# Altium schematic symbol library Resistor.SchLib: 1085 symbols (part 10 of 29)
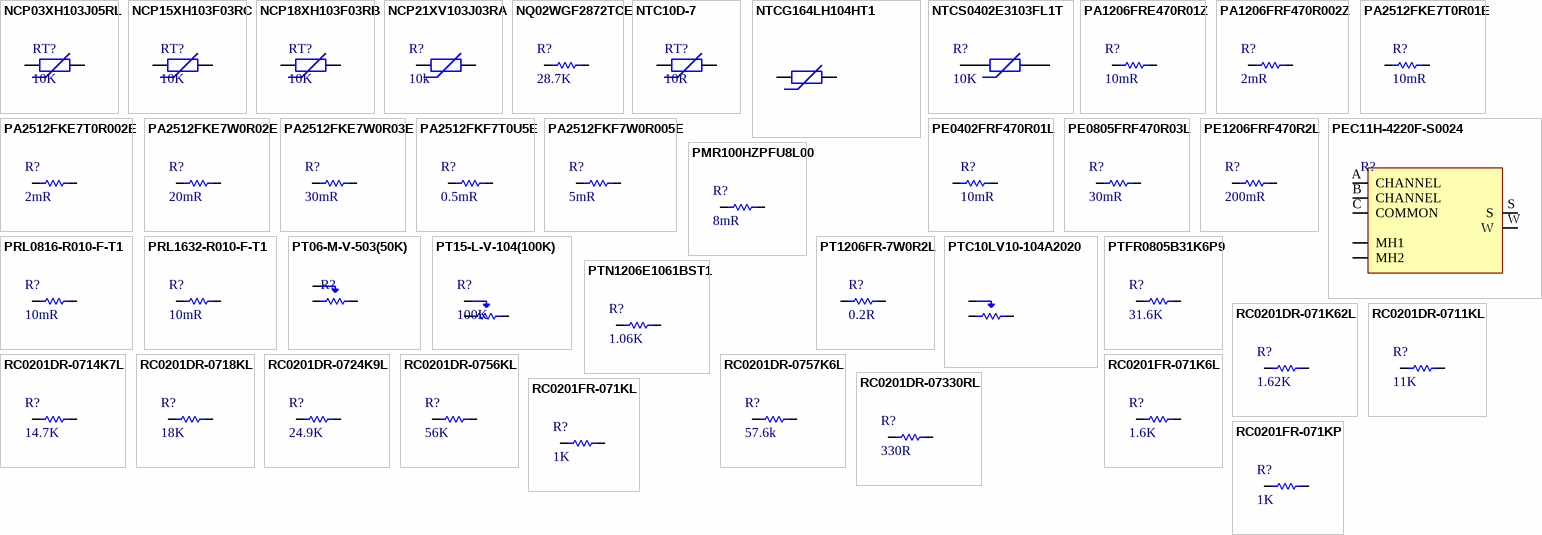
[diagram p36: symbols NCP03XH103J05RL to RC0201FR-071KP]

## PA2512FKE7W0R03E
designator R?, comment 30mR
RES 0.03 OHM 1% 2W 2512; Manufacturer: Yageo; Manufacturer Part Number: PA2512FKE7W0R03E; Item Type: Resistor; Supplier: Avnet; LCSC Part Number: C728311; RoHS: No; Stock: 4000; Pricing: 1=0.655, 25=0.542, 50=0.453, 100=0.364, 250=0.314 (USD)
footprint RES-2512
pins: 1, 2

## PA2512FKF7T0U5E
designator R?, comment 0.5mR
METAL CURRENT SENSOR 2512 1% 100; Manufacturer: Yageo; Manufacturer Part Number: PA2512FKF7T0U5E; Item Type: Resistors; Power Rating: 3W; Temperature Coefficient: 100ppm/°C; Supplier: Avnet; LCSC Part Number: PA2512FKF7T0U5E; RoHS: Yes; Stock: 12000; Pricing: 4000=0.23986 (USD); Case/Package: 348Case; Min Operating Temperature: -55°C; Max Operating Temperature: 170°C; Tolerance: 1%; Height: 880um; ComponentLink1URL: https://www.yageo.com/upload/media/product/productsearch/datasheet/rchip/PYu-PA_E_51_RoHS_10.pdf?src-supplier=Digikey; ComponentLink1Description: https://www.yageo.com/upload/media/product/productsearch/datasheet/rchip/PYu-PA_E_51_RoHS_10.pdf?src-supplier=Digikey; ComponentLink2URL: https://datasheet.octopart.com/PA2512FKF7T0U5E-Yageo-datasheet-137700559.pdf?src-supplier=Future+Electronics; ComponentLink2Description: https://datasheet.octopart.com/PA2512FKF7T0U5E-Yageo-datasheet-137700559.pdf?src-supplier=Future+Electronics
footprint RES-2512
pins: 1, 2

## PA2512FKF7W0R005E
designator R?, comment 5mR
RES 0.005 OHM 1% 2W 2512; Manufacturer: Yageo; Manufacturer Part Number: PA2512FKF7W0R005E; Item Type: Resistor; Supplier: Digikey; LCSC Part Number: C309526; RoHS: Yes; Stock: 29748; Pricing: 1=0.74, 10=0.519, 25=0.4448, 50=0.3866, 100=0.3029, 250=0.27708, 500=0.22554, 1000=0.17888 (USD); ComponentLink1URL: http://www.mouser.com/ds/2/447/PYu-PA_E_51_RoHS_5-1077983.pdf?src-supplier=Mouser; ComponentLink1Description: http://www.mouser.com/ds/2/447/PYu-PA_E_51_RoHS_5-1077983.pdf?src-supplier=Mouser; ComponentLink2URL: https://datasheet.octopart.com/PA2512FKF7W0R005E-Yageo-datasheet-137700559.pdf?src-supplier=Newark; ComponentLink2Description: https://datasheet.octopart.com/PA2512FKF7W0R005E-Yageo-datasheet-137700559.pdf?src-supplier=Newark; ComponentLink3URL: http://www.yageo.com/documents/recent/PYu-PA_E_51_RoHS_10.pdf?src-supplier=Digikey; ComponentLink3Description: http://www.yageo.com/documents/recent/PYu-PA_E_51_RoHS_10.pdf?src-supplier=Digikey; ComponentLink4URL: http://www.yageo.com/documents/recent/PYu-PA_E_51_RoHS_6.pdf?src-supplier=Digikey; ComponentLink4Description: http://www.yageo.com/documents/recent/PYu-PA_E_51_RoHS_6.pdf?src-supplier=Digikey; ComponentLink5URL: https://datasheet.octopart.com/PA2512FKF7W0R005E-Yageo-datasheet-102263284.pdf?src-supplier=Future+Electronics; ComponentLink5Description: https://datasheet.octopart.com/PA2512FKF7W0R005E-Yageo-datasheet-102263284.pdf?src-supplier=Future+Electronics
footprint RES-2512
pins: 1, 2

## PE0402FRF470R01L
designator R?, comment 10mR
RES 0.01 OHM 1% 1/4W 0402; Manufacturer: Yageo; Manufacturer Part Number: PE0402FRF470R01L; Max Power Dissipation: 250mW; Temperature Coefficient: 100ppm/°C; Item Type: Resistor; Supplier: Digikey; Supplier Part Number: 13-PE0402FRF470R01LDKR-ND; RoHS: Yes; Category: Chip SMD Resistors; Pricing: 1=0.87, 10=0.719, 25=0.666, 50=0.6086, 100=0.5006, 250=0.45928, 500=0.3812, 1000=0.31002, 5000=0.29578 (USD); Case/Package: 0402; Min Operating Temperature: -55°C; Max Operating Temperature: 125°C; Package Quantity: 10000; Packaging: Tape and Reel; Value: 10mR; Number of Terminations: 2; Tolerance: 1%; Features: Moisture Resistant,Automotive AEC-Q200; Series: PE; Length: 0.039inch; Width: 0.02inch; Height: 0.02inch; ComponentLink1URL: http://www.mouser.com/ds/2/447/PYu-PE_521_RoHS_L_3-771548.pdf?src-supplier=Mouser; ComponentLink1Description: http://www.mouser.com/ds/2/447/PYu-PE_521_RoHS_L_3-771548.pdf?src-supplier=Mouser; ComponentLink2URL: http://www.yageo.com/documents/recent/PYu-PE_521_RoHS_L_5.pdf?src-supplier=Digikey; ComponentLink2Description: http://www.yageo.com/documents/recent/PYu-PE_521_RoHS_L_5.pdf?src-supplier=Digikey; LCSC Part Number: C851613
footprint Res-0402
pins: 1, 2

## PE0805FRF470R03L
designator R?, comment 30mR
RES 0.03 OHM 1% 1/2W 0805; Manufacturer: Yageo; Manufacturer Part Number: PE0805FRF470R03L; Item Type: Resistor; Supplier: Future Electronics; LCSC Part Number: C858599; RoHS: Yes; Stock: 5000; Pricing: 5000=0.124, 10000=0.122, 15000=0.121, 20000=0.12, 25000=0.117 (USD); ComponentLink1URL: http://www.mouser.com/ds/2/447/PYu-PE_521_RoHS_L_5-1077989.pdf?src-supplier=Mouser; ComponentLink1Description: http://www.mouser.com/ds/2/447/PYu-PE_521_RoHS_L_5-1077989.pdf?src-supplier=Mouser; ComponentLink2URL: http://www.yageo.com/documents/recent/PYu-PE_521_RoHS_L_5.pdf?src-supplier=Digikey; ComponentLink2Description: http://www.yageo.com/documents/recent/PYu-PE_521_RoHS_L_5.pdf?src-supplier=Digikey
footprint RES-0805 (SMD 0805)
pins: 1, 2

## PE1206FRF470R2L
designator R?, comment 200mR
RES 0.2 OHM 1% 1W 1206; Manufacturer: Yageo; Manufacturer Part Number: PE1206FRF470R2L; Item Type: Resistors; Temperature Coefficient: 100ppm/°C; Supplier: Digikey; LCSC Part Number: C723709; RoHS: Yes; Stock: 7734; Pricing: 1=0.63, 10=0.459, 25=0.368, 50=0.2732, 100=0.1927, 250=0.17164, 500=0.14714, 1000=0.1121 (USD); Case/Package: 340Case; Packaging: 10Packaging; Value: 200mR; RoHS Compliant: Yes
footprint Res-1206
pins: 1, 2

## PEC11H-4220F-S0024
designator R?
11mm Encoder with 24 Detent Force 20mm Metal Flatted Shaft PC Pin Horizontal/Rear Facing; Manufacturer: Bourns; Manufacturer Part Number: PEC11H-4220F-S0024; Supplier: Digikey; Supplier Part Number: 118-PEC11H-4220F-S0024-ND; RoHS: No; Stock: 1001; Pricing: 1=3.04, 5=2.746, 10=2.565, 25=2.3516, 75=2.194, 150=2.0646, 300=1.89023, 450=1.77209, 975=1.65958 (USD); Item Type: Encoder; Package: Custom; LCSC Part Number: -; ComponentLink1Description: Digikey; ComponentLink1URL: https://www.digikey.com/en/products/detail/bourns-inc/PEC11H-4220F-S0024/12349532
footprint PEC11H-4220F-S0024
pins: A CHANNEL, B CHANNEL, C COMMON, MH1, MH2, S, W

## PMR100HZPFU8L00
designator R?, comment 8mR
RES 0.008 OHM 1% 2W 2512; Manufacturer: Rohm; Manufacturer Part Number: PMR100HZPFU8L00; Item Type: Resistor; Temperature Coefficient: 100ppm/°C; Supplier: Mouser; LCSC Part Number: C509729; RoHS: Yes; Stock: 23905; Pricing: 1=0.36, 10=0.276, 50=0.276, 100=0.23, 1000=0.193, 10000=0.192 (USD); Case/Package: 2512; Case Code (Imperial): 2512; Case Code (Metric): 6432; Min Operating Temperature: -55°C; Max Operating Temperature: 155°C; Tolerance: 1%; Value: 8mR; Power Rating: 2W; Features: Automotive AEC-Q200; Series: PMR; Packaging: Cut Tape; Max Power Dissipation: 2W; Number of Terminations: 2; Ratings: AEC-Q200; Lead Free: Lead Free; RoHS Compliant: Yes; ComponentLink1URL: https://datasheet.ciiva.com/16477/pmr03ezp-16477837.pdf?src-supplier=Future+Electronics; ComponentLink1Description: https://datasheet.ciiva.com/16477/pmr03ezp-16477837.pdf?src-supplier=Future+Electronics
footprint RES-2512
pins: 1, 2

## PRL0816-R010-F-T1
designator R?, comment 10mR
Current Sense Resistors - SMD 1/3W 0.01ohm 1%; Manufacturer: Susumu; Manufacturer Part Number: PRL0816-R010-F-T1; Supplier: Mouser; Supplier Part Number: 754-PRL0816-R010-FT1; RoHS: Yes; Item Type: Resistors; Stock: 4570; Pricing: 1=0.6, 10=0.429, 50=0.429, 100=0.224, 1000=0.183, 10000=0.116 (USD); Min Operating Temperature: -40°C; Max Operating Temperature: 125°C; Lead Free: 5697LeadFree; ComponentLink1URL: http://www.mouser.com/ds/2/392/n_catalog_partition07_en-1114612.pdf?src-supplier=Mouser; ComponentLink1Description: http://www.mouser.com/ds/2/392/n_catalog_partition07_en-1114612.pdf?src-supplier=Mouser
footprint RES-0306
pins: 1, 2

## PRL1632-R010-F-T1
designator R?, comment 10mR
RES 0.01 OHM 1W 1206 WIDE; Manufacturer: Susumu; Manufacturer Part Number: PRL1632-R010-F-T1; Item Type: Resistor; Supplier: Digikey; RoHS: Yes; Category: Chip SMD Resistors; Pricing: 1=0.99, 10=0.568, 25=0.4616, 50=0.397, 100=0.3431, 250=0.28528, 500=0.24984 (USD); Lead Free: 5697LeadFree; ComponentLink1URL: https://datasheet.ciiva.com/2490/prl-rl-data-sheet-2490741.pdf?src-supplier=Digikey; ComponentLink1Description: https://datasheet.ciiva.com/2490/prl-rl-data-sheet-2490741.pdf?src-supplier=Digikey; ComponentLink2URL: https://datasheet.ciiva.com/2490/prl-rl-data-sheet-2490739.pdf?src-supplier=Digikey; ComponentLink2Description: https://datasheet.ciiva.com/2490/prl-rl-data-sheet-2490739.pdf?src-supplier=Digikey; ComponentLink3URL: https://datasheet.ciiva.com/2490/prl-rl-data-sheet-2490740.pdf?src-supplier=Digikey; ComponentLink3Description: https://datasheet.ciiva.com/2490/prl-rl-data-sheet-2490740.pdf?src-supplier=Digikey
footprint Res 1206 Wide
pins: 1, 2

## PT06-M-V-503(50K)
designator R?
20% 150mW 50kΩ - Variable Resistors/Potentiometers ROHS; Manufacturer: BOCHEN; Manufacturer Part Number: PT06-M-V-503(50K); Package: Custom; LCSC Part Number: C5205067; Item Type: Potentiometer; ComponentLink1Description: LCSC; ComponentLink1URL: https://www.lcsc.com/product-detail/Variable-span-style-background-color-ff0-Resistors-span-Potentiometers_BOCHEN-Chengdu-Guosheng-Tech-PT10-M-V-503-50K_C5205087.html
footprint PT06-M-V-503(50K)
pins: 1 CCW, 2 Wiper, 3 CW

## PT15-L-V-104(100K)
designator R?, comment 100K
±20% 250mW 100kΩ - Variable Resistors/Potentiometers ROHS; Manufacturer: BOCHEN; Manufacturer Part Number: PT15-L-V-104(100K); Package: Custom; LCSC Part Number: C5205120; Item Type: Potentiometer; ComponentLink1Description: LCSC; ComponentLink1URL: https://www.lcsc.com/product-detail/Variable-Resistors-Potentiometers_BOCHEN-Chengdu-Guosheng-Tech-PT15-L-V-104-100K_C5205120.html
footprint PT15-L-V-104(100K)
pins: 1 CCW, 2 Wiper, 3 CW

## PT1206FR-7W0R2L
designator R?, comment 0.2R
RES 0.2 OHM 1% 1/2W 1206; Manufacturer: Yageo; Manufacturer Part Number: PT1206FR-7W0R2L; Value: 200mR; Max Power Dissipation: 500mW; Temperature Coefficient: 75ppm/°C; Item Type: Resistor; Supplier: Rs; Supplier Part Number: 1996026P; RoHS: Yes; Category: Chip SMD Resistors; Stock: 1100; Pricing: 100=0.134, 250=0.125, 500=0.117, 1000=0.106 (GBP); Case/Package: 1206; Min Operating Temperature: -55°C; Max Operating Temperature: 155°C; Packaging: Tape and Reel; Number of Terminations: 2; Tolerance: 1%; Features: Moisture Resistant,Automotive AEC-Q200; Series: PT; Length: 0.122inch; Width: 0.063inch; Height: 0.026inch; ComponentLink1URL: http://www.mouser.com/ds/2/447/yageodocoutput-1101729.pdf?src-supplier=Mouser; ComponentLink1Description: http://www.mouser.com/ds/2/447/yageodocoutput-1101729.pdf?src-supplier=Mouser; ComponentLink2URL: http://www.yageo.com/exep/pages/download/literatures/R-chip_current%20sensor_20140512.pdf?src-supplier=Digikey; ComponentLink2Description: http://www.yageo.com/exep/pages/download/literatures/R-chip_current%20sensor_20140512.pdf?src-supplier=Digikey; LCSC Part Number: C309533
footprint Res-1206
pins: 1, 2

## PTC10LV10-104A2020
designator VR?, comment 100K
POT 100K OHM LINEAR; Manufacturer: Amphenol Piher Sensing Systems; Manufacturer Part Number: PTC10LV10-104A2020; Item Type: Potentiometer; Package: Custom; ComponentLink1Description: Chipsmall; ComponentLink1URL: https://www.chipsmall.com/Products/PTC10LV10-104A2020_10465997.html
footprint PTC10LV10-104A2020
pins: 1 CCW, 2 CW, 3 Wiper

## PTFR0805B31K6P9
designator R?, comment 31.6K
130mW Thin Film Resistor 150V ±25ppm/℃ ±0.1% 31.6kΩ 0805 Chip Resistor - Surface Mount ROHS; Manufacturer: RESI; Manufacturer Part Number: PTFR0805B31K6P9; Package: 0805; LCSC Part Number: C2849175; Item Type: Resistor; ComponentLink1Description: LCSC; ComponentLink1URL: https://www.lcsc.com/product-detail/C2849175.html
footprint Res-0805 (SMD 0805)
pins: 1, 2

## PTN1206E1061BST1
designator R?, comment 1.06K
RES SMD 1.06K OHM 0.1% 0.4W 1206; Manufacturer: Vishay; Manufacturer Part Number: PTN1206E1061BST1; Item Type: Resistors; Max Power Dissipation: 400mW; Operating Supply Voltage: 200V; Value: 1.06kΩ; Temperature Coefficient: 25ppm/°C; Supplier: DigiKey; Supplier Part Number: PTN1206E1061BST1-ND; RoHS: Compliant; Pricing: 1000=0.4069 (USD); Case/Package: 1206; China RoHS: Compliant; Composition: Thin Film; Contact Plating: Copper, Silver, Tin; Features: Anti-Sulfur, Moisture Resistant; Height: 838.2µm; Lead Free: Lead Free; Length: 3.2004mm; Lifecycle Status: Production; Max Operating Temperature: 155°C; Min Operating Temperature: -55°C; Mounting Technology: Surface Mount; Number of Terminals: 2; Number of Terminations: 2; Power Dissipation: 400mW; Power Rating: 400mW; Radiation Hardening: No; REACH SVHC: Yes; Tolerance: 0.1%; Width: 1.6002mm; Working Voltage: 200V; ComponentLink1URL: https://datasheet.octopart.com:443/PTN1206E1061BST1-Vishay-datasheet-182028335.pdf?src-supplier=IHS; ComponentLink1Description: https://datasheet.octopart.com:443/PTN1206E1061BST1-Vishay-datasheet-182028335.pdf?src-supplier=IHS; ComponentLink2URL: https://datasheet.octopart.com/PTN1206E1061BST1-Vishay-datasheet-12605211.pdf; ComponentLink2Description: https://datasheet.octopart.com/PTN1206E1061BST1-Vishay-datasheet-12605211.pdf; ComponentLink3URL: https://datasheet.octopart.com/PTN1206E1061BST1-Vishay-datasheet-12544663.pdf; ComponentLink3Description: https://datasheet.octopart.com/PTN1206E1061BST1-Vishay-datasheet-12544663.pdf; ComponentLink4URL: https://datasheet.octopart.com/PTN1206E1061BST1-Vishay-datasheet-12531749.pdf; ComponentLink4Description: https://datasheet.octopart.com/PTN1206E1061BST1-Vishay-datasheet-12531749.pdf; ComponentLink5URL: https://datasheet.octopart.com/PTN1206E1061BST1-Vishay-datasheet-12519045.pdf; ComponentLink5Description: https://datasheet.octopart.com/PTN1206E1061BST1-Vishay-datasheet-12519045.pdf; ComponentLink6URL: https://datasheet.octopart.com/PTN1206E1061BST1-Vishay-datasheet-12511831.pdf; ComponentLink6Description: https://datasheet.octopart.com/PTN1206E1061BST1-Vishay-datasheet-12511831.pdf; ComponentLink7URL: https://datasheet.octopart.com/PTN1206E1061BST1-Vishay-datasheet-8399772.pdf; ComponentLink7Description: https://datasheet.octopart.com/PTN1206E1061BST1-Vishay-datasheet-8399772.pdf; ComponentLink8URL: https://datasheet.octopart.com/PTN1206E1061BST1-Vishay-datasheet-8372250.pdf; ComponentLink8Description: https://datasheet.octopart.com/PTN1206E1061BST1-Vishay-datasheet-8372250.pdf; ComponentLink9URL: https://datasheet.octopart.com/PTN1206E1061BST1-Vishay-datasheet-5315827.pdf; ComponentLink9Description: https://datasheet.octopart.com/PTN1206E1061BST1-Vishay-datasheet-5315827.pdf; ComponentLink10URL: http://sigma.octopart.com:80/rohs_statement/Vishay-company-15.pdf?src-supplier=Compliance+Statements; ComponentLink10Description: http://sigma.octopart.com:80/rohs_statement/Vishay-company-15.pdf?src-supplier=Compliance+Statements
footprint Res-1206
pins: 1, 2

## RC0201DR-071K62L
designator R?, comment 1.62K
RES 1.62K OHM 0.5% 1/20W 0201; Manufacturer: Yageo; Manufacturer Part Number: RC0201DR-071K62L; Value: 1.62kR; Max Power Dissipation: 50mW; Temperature Coefficient: 200ppm/°C; Item Type: Resistor; Supplier: Avnet; Supplier Part Number: RC0201DR-071K62L; RoHS: Yes; Category: Chip SMD Resistors; Pricing: 10000=0.01131 (USD); Case/Package: 0201; Min Operating Temperature: -55°C; Max Operating Temperature: 125°C; Packaging: Tape and Reel; Number of Terminations: 2; Tolerance: 0.5%; Features: Moisture Resistant; Series: RC; Length: 0.024inch; Width: 0.012inch; Height: 0.01inch; RoHS Compliant: Yes; ComponentLink1URL: http://www.yageo.com.tw/exep/pages/download/literatures/PYu-R_INT-thick_7.pdf?src-supplier=Digikey; ComponentLink1Description: http://www.yageo.com.tw/exep/pages/download/literatures/PYu-R_INT-thick_7.pdf?src-supplier=Digikey; LCSC Part Number: C851673
footprint Res-0201
pins: 1, 2

## RC0201DR-0711KL
designator R?, comment 11K
RES 11K OHM 0.5% 1/20W 0201; Manufacturer: Yageo; Manufacturer Part Number: RC0201DR-0711KL; Item Type: Resistors; Value: 11kR; Max Power Dissipation: 50mW; Temperature Coefficient: 200ppm/°C; Supplier: Digikey; LCSC Part Number: C851642; RoHS: Yes; Stock: 20000; Pricing: 1=0.16, 10=0.081, 100=0.0459, 1000=0.02998, 2500=0.02636, 5000=0.02428 (USD); Case/Package: 0201; Min Operating Temperature: -55°C; Max Operating Temperature: 125°C; Packaging: Tape and Reel; Number of Terminations: 2; Tolerance: 0.5%; Features: Moisture Resistant; Series: RC; Length: 0.024inch; Width: 0.012inch; Height: 0.01inch; RoHS Compliant: Yes; ComponentLink1URL: http://www.yageo.com.tw/exep/pages/download/literatures/PYu-R_INT-thick_7.pdf?src-supplier=Digikey; ComponentLink1Description: http://www.yageo.com.tw/exep/pages/download/literatures/PYu-R_INT-thick_7.pdf?src-supplier=Digikey
footprint Res-0201
pins: 1, 2

## RC0201DR-0714K7L
designator R?, comment 14.7K
RES 14.7K OHM 0.5% 1/20W 0201; Manufacturer: Yageo; Manufacturer Part Number: RC0201DR-0714K7L; Item Type: Resistors; Value: 14.7kR; Max Power Dissipation: 50mW; Temperature Coefficient: 200ppm/°C; Supplier: Mouser; LCSC Part Number: C851654; RoHS: Yes; Pricing: 1=0.11, 10=0.061, 50=0.061, 100=0.044, 1000=0.031, 10000=0.019 (USD); Case/Package: 0201; Min Operating Temperature: -55°C; Max Operating Temperature: 125°C; Packaging: Tape and Reel; Number of Terminations: 2; Tolerance: 0.5%; Features: Moisture Resistant; Series: RC; Length: 0.024inch; Width: 0.012inch; Height: 0.01inch; RoHS Compliant: Yes; ComponentLink1URL: http://www.yageo.com.tw/exep/pages/download/literatures/PYu-R_INT-thick_7.pdf?src-supplier=Digikey; ComponentLink1Description: http://www.yageo.com.tw/exep/pages/download/literatures/PYu-R_INT-thick_7.pdf?src-supplier=Digikey
footprint Res-0201
pins: 1, 2

## RC0201DR-0718KL
designator R?, comment 18K
RES 18K OHM 0.5% 1/20W 0201; Manufacturer: Yageo; Manufacturer Part Number: RC0201DR-0718KL; Item Type: Resistors; Value: 18kR; Max Power Dissipation: 50mW; Temperature Coefficient: 200ppm/°C; Supplier: Digikey; LCSC Part Number: C851662; RoHS: Yes; Pricing: 10000=0.02201 (USD); Case/Package: 0201; Min Operating Temperature: -55°C; Max Operating Temperature: 125°C; Packaging: Tape and Reel; Number of Terminations: 2; Tolerance: 0.5%; Features: Moisture Resistant; Series: RC; Length: 0.024inch; Width: 0.012inch; Height: 0.01inch; RoHS Compliant: Yes; ComponentLink1URL: http://www.yageo.com.tw/exep/pages/download/literatures/PYu-R_INT-thick_7.pdf?src-supplier=Digikey; ComponentLink1Description: http://www.yageo.com.tw/exep/pages/download/literatures/PYu-R_INT-thick_7.pdf?src-supplier=Digikey
footprint Res-0201
pins: 1, 2

## RC0201DR-0724K9L
designator R?, comment 24.9K
RES 24.9K OHM 0.5% 1/20W 0201; Manufacturer: Yageo; Manufacturer Part Number: RC0201DR-0724K9L; Value: 24.9kR; Max Power Dissipation: 50mW; Temperature Coefficient: 200ppm/°C; Item Type: Resistor; Supplier 1: Digi-Key; RoHS: Yes; Category: Chip SMD Resistors; Pricing 1: 10000=0.02267 (USD); Case/Package: 0201; Min Operating Temperature: -55°C; Max Operating Temperature: 125°C; Packaging: Tape and Reel; Number of Terminations: 2; Tolerance: 0.5%; Features: Moisture Resistant; Series: RC; Length: 0.024inch; Width: 0.012inch; Height: 0.01inch; RoHS Compliant: Yes; ComponentLink1URL: http://www.yageo.com.tw/exep/pages/download/literatures/PYu-R_INT-thick_7.pdf?src-supplier=Digi-Key; ComponentLink1Description: http://www.yageo.com.tw/exep/pages/download/literatures/PYu-R_INT-thick_7.pdf?src-supplier=Digi-Key; Supplier Part Number 1: RC0201DR-0724K9L-ND; LCSC Part Number: C851690
footprint Res-0201
pins: 1, 2

## RC0201DR-0756KL
designator R?, comment 56K
RES 56K OHM 0.5% 1/20W 0201; Manufacturer: Yageo; Manufacturer Part Number: RC0201DR-0756KL; Item Type: Resistors; Value: 56kR; Max Power Dissipation: 50mW; Temperature Coefficient: 200ppm/°C; Supplier: Digikey; LCSC Part Number: C851761; RoHS: Yes; Pricing: 10000=0.02201 (USD); Case/Package: 0201; Min Operating Temperature: -55°C; Max Operating Temperature: 125°C; Packaging: Tape and Reel; Number of Terminations: 2; Tolerance: 0.5%; Features: Moisture Resistant; Series: RC; Length: 0.024inch; Width: 0.012inch; Height: 0.01inch; RoHS Compliant: Yes; ComponentLink1URL: http://www.yageo.com.tw/exep/pages/download/literatures/PYu-R_INT-thick_7.pdf?src-supplier=Digikey; ComponentLink1Description: http://www.yageo.com.tw/exep/pages/download/literatures/PYu-R_INT-thick_7.pdf?src-supplier=Digikey
footprint Res-0201
pins: 1, 2

## RC0201DR-0757K6L
designator R?, comment 57.6k
RES 57.6K OHM 0.5% 1/20W 0201; Manufacturer: Yageo; Manufacturer Part Number: RC0201DR-0757K6L; Value: 57.6kR; Max Power Dissipation: 50mW; Temperature Coefficient: 200ppm/°C; Item Type: Resistor; Supplier 1: Digi-Key; RoHS: Yes; Category: Chip SMD Resistors; Pricing 1: 10000=0.02267 (USD); Case/Package: 0201; Min Operating Temperature: -55°C; Max Operating Temperature: 125°C; Packaging: Tape and Reel; Number of Terminations: 2; Tolerance: 0.5%; Features: Moisture Resistant; Series: RC; Length: 0.024inch; Width: 0.012inch; Height: 0.01inch; RoHS Compliant: Yes; ComponentLink1URL: http://www.yageo.com.tw/exep/pages/download/literatures/PYu-R_INT-thick_7.pdf?src-supplier=Digi-Key; ComponentLink1Description: http://www.yageo.com.tw/exep/pages/download/literatures/PYu-R_INT-thick_7.pdf?src-supplier=Digi-Key; LCSC Part Number: C851763; Supplier Part Number 1: RC0201DR-0757K6L-ND
footprint Res-0201
pins: 1, 2

## RC0201DR-07330RL
designator R?, comment 330R
RES 330 OHM 0.5% 1/20W 0201; Manufacturer: Yageo; Manufacturer Part Number: RC0201DR-07330RL; Max Power Dissipation: 50mW; Temperature Coefficient: 200ppm/°C; Item Type: Resistor; Supplier 1: Digi-Key; RoHS: Yes; Category: Chip SMD Resistors; Pricing 1: 10000=0.02267 (USD); Case/Package: 0201; Min Operating Temperature: -55°C; Max Operating Temperature: 125°C; Packaging: Tape and Reel; Value: 330R; Number of Terminations: 2; Tolerance: 0.5%; Features: Moisture Resistant; Series: RC; Length: 0.024inch; Width: 0.012inch; Height: 0.01inch; RoHS Compliant: Yes; ComponentLink1URL: http://www.yageo.com.tw/exep/pages/download/literatures/PYu-R_INT-thick_7.pdf?src-supplier=Digi-Key; ComponentLink1Description: http://www.yageo.com.tw/exep/pages/download/literatures/PYu-R_INT-thick_7.pdf?src-supplier=Digi-Key; Supplier Part Number 1: RC0201DR-07330RL-ND; LCSC Part Number: C851717
footprint Res-0201
pins: 1, 2

## RC0201FR-071K6L
designator R?, comment 1.6K
RES 1.6K OHM 1% 1/20W 0201; Manufacturer: Yageo; Manufacturer Part Number: RC0201FR-071K6L; Item Type: Resistors; Voltage Rating: 25V; Supplier: Mouser; LCSC Part Number: C295784; RoHS: Yes; Stock: 495835; Pricing: 1=0.1, 10=0.008, 50=0.008, 100=0.006, 1000=0.006, 10000=0.005 (USD); ComponentLink1URL: http://www.yageo.com/documents/recent/PYu-RC_Group_51_RoHS_L_9.pdf?src-supplier=Digikey; ComponentLink1Description: http://www.yageo.com/documents/recent/PYu-RC_Group_51_RoHS_L_9.pdf?src-supplier=Digikey; ComponentLink2URL: https://www.yageo.com/upload/media/product/productsearch/datasheet/rchip/PYu-RC_Group_51_RoHS_L_11.pdf?src-supplier=Digikey; ComponentLink2Description: https://www.yageo.com/upload/media/product/productsearch/datasheet/rchip/PYu-RC_Group_51_RoHS_L_11.pdf?src-supplier=Digikey; ComponentLink3URL: https://datasheet.octopart.com/RC0201FR-071K6L-Yageo-datasheet-164759695.pdf?src-supplier=Future+Electronics; ComponentLink3Description: https://datasheet.octopart.com/RC0201FR-071K6L-Yageo-datasheet-164759695.pdf?src-supplier=Future+Electronics
footprint Res-0201
pins: 1, 2

## RC0201FR-071KL
designator R?, comment 1K
RES 1K OHM 1% 1/20W 0201; Manufacturer: Yageo; Manufacturer Part Number: RC0201FR-071KL; Value: 1kR; Temperature Coefficient: 200ppm/°C; Power Rating: 50mW; Voltage Rating: 25V; Item Type: Resistor; Supplier: Digi-Key; Supplier Part Number: 311-1KMCT-ND; RoHS: Yes; Category: Chip SMD Resistors; Stock: 5606340; Pricing: 1=0.1, 10=0.027, 50=0.0172, 100=0.0143, 500=0.00988, 1000=0.00854, 5000=0.00629 (USD); Case/Package: 0201; Contact Plating: Tin,Matte; Case Code (Metric): 0603; Case Code (Imperial): 0201; Min Operating Temperature: -55°C; Max Operating Temperature: 125°C; Tolerance: 1%; Resistor Type: Thick Film; Package Quantity: 10000; Packaging: Tape and Reel; Number of Terminations: 2; Termination: SMD/SMT; Max Power Dissipation: 50mW; Working Voltage: 25V; Features: Moisture Resistant; Series: RC; Resistance Tolerance: 1%; Technology: THICK FILM; Construction: Rectangular; Voltage Rating (DC): 25V; Length: 0.024inch; Width: 0.012inch; Height: 0.01inch; Depth: 0.3mm; Military Standard: Not; RoHS Compliant: Yes; Reach SVHC Compliant: Unknown; Lead Free: 5697LeadFree; ComponentLink1URL: https://datasheet.ciiva.com/7672/1563626-7672204.pdf?src-supplier=Element14; ComponentLink1Description: https://datasheet.ciiva.com/7672/1563626-7672204.pdf?src-supplier=Element14; ComponentLink2URL: https://datasheet.ciiva.com/22698/1563626-22698505.pdf?src-supplier=Element14; ComponentLink2Description: https://datasheet.ciiva.com/22698/1563626-22698505.pdf?src-supplier=Element14; ComponentLink3URL: https://datasheet.ciiva.com/29721/pyu-r-int-thick-7-29721196.pdf?src-supplier=Digi-Key; ComponentLink3Description: https://datasheet.ciiva.com/29721/pyu-r-int-thick-7-29721196.pdf?src-supplier=Digi-Key; ComponentLink4URL: https://datasheet.ciiva.com/29721/pyu-r-int-thick-7-29721195.pdf?src-supplier=Digi-Key; ComponentLink4Description: https://datasheet.ciiva.com/29721/pyu-r-int-thick-7-29721195.pdf?src-supplier=Digi-Key; ComponentLink5URL: https://datasheet.ciiva.com/8896/pyu-rc0201-51-rohs-l-8-8896174.pdf?src-supplier=Avnet; ComponentLink5Description: https://datasheet.ciiva.com/8896/pyu-rc0201-51-rohs-l-8-8896174.pdf?src-supplier=Avnet; LCSC Part Number: C138165
footprint Res-0201
pins: 1, 2

## RC0201FR-071KP
designator R?, comment 1K
RES 1K OHM 1% 1/20W 0201; Manufacturer: Yageo; Manufacturer Part Number: RC0201FR-071KP; Supplier 1: Digi-Key; RoHS: Yes; Stock 1: 4800; Pricing 1: 1=0.11000, 10=0.10200, 100=0.03940, 1000=0.01734, 2500=0.01497, 5000=0.01340 (USD); RoHS Compliant: Yes; Supplier Part Number 1: 13-RC0201FR-071KPCT-ND; LCSC Part Number: C3953443
footprint Res-0201
pins: 1, 2

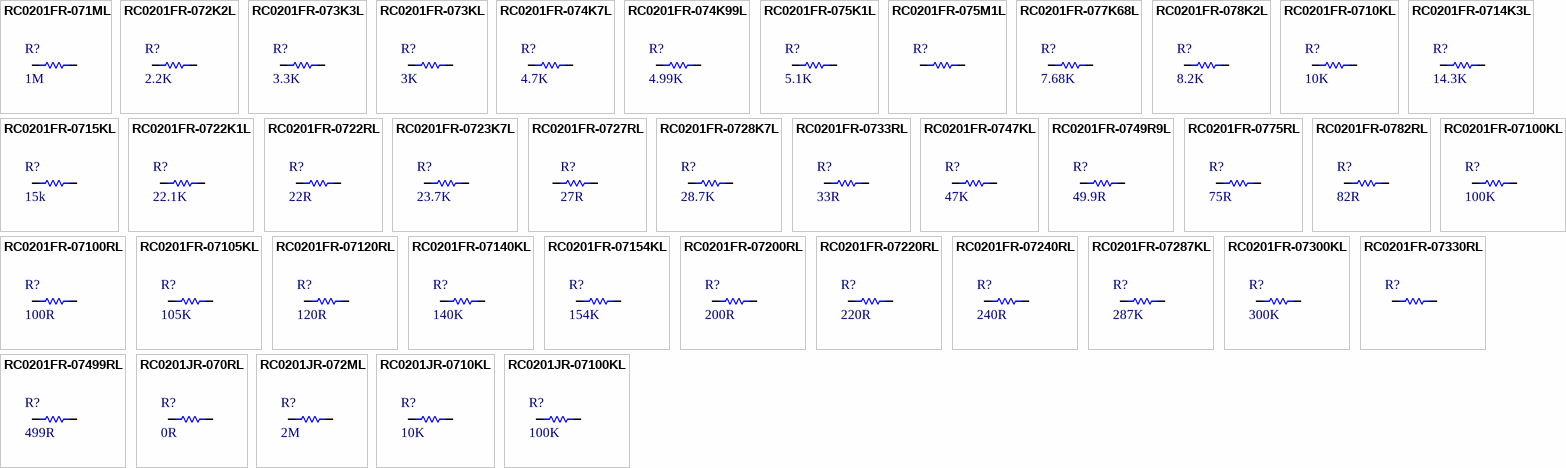
[diagram p11: symbols RC0201FR-071ML to RC0201JR-07100KL]

## RC0201FR-071ML
designator R?, comment 1M
RES 1M OHM 1% 1/20W 0201; Manufacturer: Yageo; Manufacturer Part Number: RC0201FR-071ML; Item Type: Resistor; Value: 1MR; Temperature Coefficient: 200ppm/°C; Power Rating: 50mW; Voltage Rating: 25V; Supplier: Avnet; LCSC Part Number: C295786; RoHS: Yes; Stock: 13025; Pricing: 1=0.104, 25=0.016, 100=0.008, 250=0.007, 1000=0.006 (USD); Case/Package: 0201; Contact Plating: Tin,Matte; Case Code (Imperial): 0201; Case Code (Metric): 0603; Min Operating Temperature: -55°C; Max Operating Temperature: 125°C; Tolerance: 1%; Resistor Type: Thick Film; Packaging: Tape and Reel; Package Quantity: 10000; Termination: SMD/SMT; Number of Terminations: 2; Max Power Dissipation: 50mW; Features: Moisture Resistant; Series: RC; Resistance Tolerance: 1%; Construction: Rectangular; Voltage Rating (DC): 25V; Length: 0.6mm; Width: 0.3mm; Height: 0.01inch; Depth: 0.3mm; Military Standard: Not; RoHS Compliant: Yes; Reach SVHC Compliant: Unknown; Lead Free: 5697LeadFree; ComponentLink1URL: https://datasheet.ciiva.com/29721/pyu-r-int-thick-7-29721005.pdf?src-supplier=Digikey; ComponentLink1Description: https://datasheet.ciiva.com/29721/pyu-r-int-thick-7-29721005.pdf?src-supplier=Digikey; ComponentLink2URL: https://datasheet.ciiva.com/29721/pyu-r-int-thick-7-29721006.pdf?src-supplier=Digikey; ComponentLink2Description: https://datasheet.ciiva.com/29721/pyu-r-int-thick-7-29721006.pdf?src-supplier=Digikey; ComponentLink3URL: https://datasheet.ciiva.com/7672/1563626-7672207.pdf?src-supplier=Element14; ComponentLink3Description: https://datasheet.ciiva.com/7672/1563626-7672207.pdf?src-supplier=Element14; ComponentLink4URL: https://datasheet.ciiva.com/22698/1563626-22698507.pdf?src-supplier=Element14; ComponentLink4Description: https://datasheet.ciiva.com/22698/1563626-22698507.pdf?src-supplier=Element14; ComponentLink5URL: https://datasheet.ciiva.com/25647/pyu-r-int-thick-7-25647311.pdf?src-supplier=Digikey; ComponentLink5Description: https://datasheet.ciiva.com/25647/pyu-r-int-thick-7-25647311.pdf?src-supplier=Digikey
footprint Res-0201
pins: 1, 2

## RC0201FR-072K2L
designator R?, comment 2.2K
RES 2.2K OHM 1% 1/20W 0201; Manufacturer: Yageo; Manufacturer Part Number: RC0201FR-072K2L; Resistance: 2.2kR; Power Rating: 50mW; Voltage Rating: 25V; Temperature Coefficient: 200ppm/°C; Item Type: Resistor; Supplier 1: Arrow Electronics; RoHS: Yes; Category: Chip SMD Resistors; Stock 1: 90000; Pricing 1: 10000=0.00510, 30000=0.00350, 50000=0.00330, 100000=0.00220 (USD); Case/Package: 0201; Case Code (Imperial): 0201; Case Code (Metric): 0603; Size Code: 0201; Min Operating Temperature: -55°C; Max Operating Temperature: 125°C; Tolerance: 1%; Packaging: Tape and Reel; Resistor Type: Thick Film; Number of Terminations: 2; Termination: SMD/SMT; Max Power Dissipation: 50mW; Features: Moisture Resistant; Series: RC; Resistance Tolerance: 1%; Construction: Rectangular; Length: 0.024inch; Width: 0.3mm; Height: 0.01inch; Depth: 0.3mm; Military Standard: Not; Lead Free: Lead Free; RoHS Compliant: Yes; ComponentLink1URL: https://datasheet.ciiva.com/7672/1563626-7672218.pdf?src-supplier=Element14; ComponentLink1Description: https://datasheet.ciiva.com/7672/1563626-7672218.pdf?src-supplier=Element14; Supplier Part Number 1: RC0201FR-072K2L; LCSC Part Number: C142018
footprint Res-0201
pins: 1, 2

## RC0201FR-073K3L
designator R?, comment 3.3K
RES 3.3K OHM 1% 1/20W 0201; Manufacturer: Yageo; Manufacturer Part Number: RC0201FR-073K3L; Item Type: Resistor; Supplier: Future Electronics; Supplier Part Number: 1068525; RoHS: Yes; Category: Chip SMD Resistors; Stock: 40000; Pricing: 10000=0.0009, 50000=0.0013, 100000=0.0008, 250000=0.0013, 400000=0.0008, 750000=0.0012, 1500000=0.0007, 2000000=0.0011, 5000000=0.0007 (USD); ComponentLink1URL: https://datasheet.ciiva.com/14985/pyu-r-int-thick-7-14985418.pdf?src-supplier=Digi-Key; ComponentLink1Description: https://datasheet.ciiva.com/14985/pyu-r-int-thick-7-14985418.pdf?src-supplier=Digi-Key; ComponentLink2URL: https://datasheet.ciiva.com/22698/1563626-22698524.pdf?src-supplier=Element14; ComponentLink2Description: https://datasheet.ciiva.com/22698/1563626-22698524.pdf?src-supplier=Element14; LCSC Part Number: C274874
footprint Res-0201
pins: 1, 2

## RC0201FR-073KL
designator R?, comment 3K
RES 3K OHM 1% 1/20W 0201; Manufacturer: Yageo; Manufacturer Part Number: RC0201FR-073KL; Item Type: Resistor; Supplier: Future Electronics; Supplier Part Number: 2837441; RoHS: Yes; Category: Chip SMD Resistors; Stock: 10000; Pricing: 10000=0.0013, 50000=0.0012, 250000=0.0012, 750000=0.0011, 2000000=0.001 (USD); ComponentLink1URL: http://www.yageo.com/documents/recent/PYu-RC_Group_51_RoHS_L_9.pdf?src-supplier=Digi-Key; ComponentLink1Description: http://www.yageo.com/documents/recent/PYu-RC_Group_51_RoHS_L_9.pdf?src-supplier=Digi-Key; ComponentLink2URL: http://www.yageo.com/documents/recent/PYu-RC_Group_51_RoHS_L_10.pdf?src-supplier=Digi-Key; ComponentLink2Description: http://www.yageo.com/documents/recent/PYu-RC_Group_51_RoHS_L_10.pdf?src-supplier=Digi-Key; ComponentLink3URL: http://www.yageo.com.tw/exep/pages/download/literatures/PYu-R_INT-thick_7.pdf?src-supplier=Digi-Key; ComponentLink3Description: http://www.yageo.com.tw/exep/pages/download/literatures/PYu-R_INT-thick_7.pdf?src-supplier=Digi-Key; ComponentLink4URL: https://datasheet.octopart.com/RC0201FR-073KL-Yageo-datasheet-164759695.pdf?src-supplier=Future+Electronics; ComponentLink4Description: https://datasheet.octopart.com/RC0201FR-073KL-Yageo-datasheet-164759695.pdf?src-supplier=Future+Electronics; LCSC Part Number: C142016
footprint Res-0201
pins: 1, 2

## RC0201FR-074K7L
designator R?, comment 4.7K
RES 4.7K OHM 1% 1/20W 0201; Manufacturer: Yageo; Manufacturer Part Number: RC0201FR-074K7L; Item Type: Resistor; Supplier: Future Electronics; Supplier Part Number: 7537285; RoHS: Yes; Category: Chip SMD Resistors; Stock: 1610000; Pricing: 10000=0.0014, 50000=0.0013, 250000=0.0013, 750000=0.0012, 2000000=0.0011 (USD); ComponentLink1URL: https://datasheet.ciiva.com/2493/pyu-r-int-thick-7-2493811.pdf?src-supplier=Digi-Key; ComponentLink1Description: https://datasheet.ciiva.com/2493/pyu-r-int-thick-7-2493811.pdf?src-supplier=Digi-Key; ComponentLink2URL: https://datasheet.ciiva.com/2493/pyu-r-int-thick-7-2493812.pdf?src-supplier=Digi-Key; ComponentLink2Description: https://datasheet.ciiva.com/2493/pyu-r-int-thick-7-2493812.pdf?src-supplier=Digi-Key; ComponentLink3URL: https://datasheet.ciiva.com/2493/pyu-r-int-thick-7-2493813.pdf?src-supplier=Digi-Key; ComponentLink3Description: https://datasheet.ciiva.com/2493/pyu-r-int-thick-7-2493813.pdf?src-supplier=Digi-Key; ComponentLink4URL: https://datasheet.ciiva.com/8892/pyu-rc0201-51-rohs-l-8-8892942.pdf?src-supplier=Avnet; ComponentLink4Description: https://datasheet.ciiva.com/8892/pyu-rc0201-51-rohs-l-8-8892942.pdf?src-supplier=Avnet; ComponentLink5URL: https://datasheet.ciiva.com/7672/1563626-7672233.pdf?src-supplier=Element14; ComponentLink5Description: https://datasheet.ciiva.com/7672/1563626-7672233.pdf?src-supplier=Element14; LCSC Part Number: C138135
footprint Res-0201
pins: 1, 2

## RC0201FR-074K99L
designator R?, comment 4.99K
RES 4.99K OHM 1% 1/20W 0201; Manufacturer: Yageo; Manufacturer Part Number: RC0201FR-074K99L; Item Type: Resistor; Voltage Rating: 25V; Supplier: Avnet; LCSC Part Number: C273265; RoHS: Yes; Stock: 6092; Pricing: 1=0.104, 25=0.015, 100=0.009, 250=0.008, 1000=0.007 (USD); Lead Free: 5697LeadFree; ComponentLink1URL: https://www.yageo.com/upload/media/product/productsearch/datasheet/rchip/PYu-RC_Group_51_RoHS_L_11.pdf?src-supplier=Digikey; ComponentLink1Description: https://www.yageo.com/upload/media/product/productsearch/datasheet/rchip/PYu-RC_Group_51_RoHS_L_11.pdf?src-supplier=Digikey; ComponentLink2URL: http://www.yageo.com/documents/recent/PYu-RC_Group_51_RoHS_L_10.pdf?src-supplier=Digikey; ComponentLink2Description: http://www.yageo.com/documents/recent/PYu-RC_Group_51_RoHS_L_10.pdf?src-supplier=Digikey; ComponentLink3URL: https://datasheet.octopart.com/RC0201FR-074K99L-Yageo-datasheet-164759695.pdf?src-supplier=Future+Electronics; ComponentLink3Description: https://datasheet.octopart.com/RC0201FR-074K99L-Yageo-datasheet-164759695.pdf?src-supplier=Future+Electronics
footprint Res-0201
pins: 1, 2

## RC0201FR-075K1L
designator R?, comment 5.1K
RES 5.1K OHM 1% 1/20W 0201; Manufacturer: Yageo; Manufacturer Part Number: RC0201FR-075K1L; Power Rating: 50mW; Value: 5.1kR; Voltage Rating: 25V; Temperature Coefficient: 200ppm/°C; Item Type: Resistor; Supplier: Future Electronics; Supplier Part Number: 9072847; RoHS: Yes; Category: Chip SMD Resistors; Stock: 280000; Pricing: 10000=0.0014, 40000=0.0013, 200000=0.0013, 400000=0.0012, 1250000=0.0011 (USD); Case/Package: 0201; Case Code (Imperial): 0201; Case Code (Metric): 0603; Min Operating Temperature: -55°C; Max Operating Temperature: 125°C; Packaging: Tape and Reel; Tolerance: 1%; Termination: SMD/SMT; Number of Terminations: 2; Max Power Dissipation: 50mW; Features: Moisture Resistant; Series: RC; Length: 0.6mm; Width: 0.3mm; Height: 0.23mm; Lead Free: Lead Free; RoHS Compliant: Yes; ComponentLink1URL: http://www.mouser.com/ds/2/447/RC0201-559633.pdf?src-supplier=Mouser; ComponentLink1Description: http://www.mouser.com/ds/2/447/RC0201-559633.pdf?src-supplier=Mouser; ComponentLink2URL: https://datasheet.octopart.com/RC0201FR-075K1L-Yageo-datasheet-164759695.pdf?src-supplier=Future+Electronics; ComponentLink2Description: https://datasheet.octopart.com/RC0201FR-075K1L-Yageo-datasheet-164759695.pdf?src-supplier=Future+Electronics; ComponentLink3URL: http://www.yageo.com/documents/recent/PYu-RC_Group_51_RoHS_L_10.pdf?src-supplier=Digi-Key; ComponentLink3Description: http://www.yageo.com/documents/recent/PYu-RC_Group_51_RoHS_L_10.pdf?src-supplier=Digi-Key; LCSC Part Number: C274341
footprint Res-0201
pins: 1, 2

## RC0201FR-075M1L
designator R?
50mW Thick Film Resistor 25V ±1% ±200ppm/℃ 5.1MΩ 0201 Chip Resistor - Surface Mount ROHS; Manufacturer: YAGEO; Manufacturer Part Number: RC0201FR-075M1L; Package: 0201; LCSC Part Number: C474428; Item Type: Resistor
footprint Res-0201
pins: 1, 2

## RC0201FR-077K68L
designator R?, comment 7.68K
RES 7.68K OHM 1% 1/20W 0201; Manufacturer: Yageo; Manufacturer Part Number: RC0201FR-077K68L; Item Type: Resistor; Value: 7.68kR; Max Power Dissipation: 50mW; Temperature Coefficient: 200ppm/°C; Voltage Rating: 25V; Supplier: Arrow Electronics; LCSC Part Number: C274359; RoHS: Yes; Stock: 7559; Pricing: 1=0.056, 10=0.0078, 100=0.0044, 250=0.0043, 1000=0.0025, 3000=0.0021, 6000=0.0013 (USD); Case/Package: 0201; Case Code (Metric): 0603; Case Code (Imperial): 0201; Min Operating Temperature: -55°C; Max Operating Temperature: 125°C; Tolerance: 1%; Packaging: Cut Tape; Number of Terminations: 2; Features: Moisture Resistant; Series: RC; Length: 0.024inch; Width: 0.012inch; Height: 0.01inch; RoHS Compliant: Yes; ComponentLink1URL: http://www.yageo.com/documents/recent/PYu-RC_Group_51_RoHS_L_10.pdf?src-supplier=Digikey; ComponentLink1Description: http://www.yageo.com/documents/recent/PYu-RC_Group_51_RoHS_L_10.pdf?src-supplier=Digikey; ComponentLink2URL: http://www.yageo.com.tw/exep/pages/download/literatures/PYu-R_INT-thick_7.pdf?src-supplier=Digikey; ComponentLink2Description: http://www.yageo.com.tw/exep/pages/download/literatures/PYu-R_INT-thick_7.pdf?src-supplier=Digikey; ComponentLink3URL: https://www.yageo.com/upload/media/product/productsearch/datasheet/rchip/PYu-RC_Group_51_RoHS_L_11.pdf?src-supplier=Digikey; ComponentLink3Description: https://www.yageo.com/upload/media/product/productsearch/datasheet/rchip/PYu-RC_Group_51_RoHS_L_11.pdf?src-supplier=Digikey
footprint Res-0201
pins: 1, 2

## RC0201FR-078K2L
designator R?, comment 8.2K
RES 8.2K OHM 1% 1/20W 0201; Manufacturer: Yageo; Manufacturer Part Number: RC0201FR-078K2L; Resistance: 8.2kR; Power Rating: 50mW; Voltage Rating: 25V; Temperature Coefficient: 200ppm/°C; Item Type: Resistor; Supplier 1: Arrow Electronics; RoHS: Yes; Category: Chip SMD Resistors; Stock 1: 50000; Pricing 1: 10000=0.00370 (USD); Case/Package: 0201; Case Code (Metric): 0603; Case Code (Imperial): 0201; Min Operating Temperature: -55°C; Max Operating Temperature: 125°C; Package Quantity: 10000; Packaging: Tape and Reel; Tolerance: 1%; Resistor Type: Thick Film; Number of Terminations: 2; Termination: SMD/SMT; Max Power Dissipation: 50mW; Features: Moisture Resistant; Series: RC; Resistance Tolerance: 1%; Length: 0.024inch; Width: 0.3mm; Height: 0.01inch; Reach SVHC Compliant: Yes; Lead Free: Lead Free; RoHS Compliant: Yes; ComponentLink1URL: https://datasheet.ciiva.com/14985/pyu-r-int-thick-7-14985436.pdf?src-supplier=Digi-Key; ComponentLink1Description: https://datasheet.ciiva.com/14985/pyu-r-int-thick-7-14985436.pdf?src-supplier=Digi-Key; Supplier Part Number 1: RC0201FR-078K2L; LCSC Part Number: C274879
footprint Res-0201
pins: 1, 2

## RC0201FR-0710KL
designator R?, comment 10K
RES SMD 10K OHM 1% 1/20W 0201; Manufacturer: Yageo; Manufacturer Part Number: RC0201FR-0710KL; Item Type: Resistor; Package: 0201; ComponentLink7Description: LCSC; ComponentLink7URL: https://www.lcsc.com/product-detail/Chip-Resistor-Surface-Mount_YAGEO-RC0201FR-0710KL_C106225.html; LCSC Part Number: C106225
footprint Res-0201
pins: 1, 2

## RC0201FR-0714K3L
designator R?, comment 14.3K
RES 14.3K OHM 1% 1/20W 0201; Manufacturer: Yageo; Manufacturer Part Number: RC0201FR-0714K3L; Item Type: Resistors; Voltage Rating: 25V; Supplier: Avnet; LCSC Part Number: C273298; RoHS: Yes; Stock: 7360; Pricing: 1=0.104, 25=0.018, 100=0.009, 250=0.008, 500=0.007 (USD); Lead Free: 5697LeadFree; ComponentLink1URL: https://www.yageo.com/upload/media/product/productsearch/datasheet/rchip/PYu-RC_Group_51_RoHS_L_11.pdf?src-supplier=Digikey; ComponentLink1Description: https://www.yageo.com/upload/media/product/productsearch/datasheet/rchip/PYu-RC_Group_51_RoHS_L_11.pdf?src-supplier=Digikey; ComponentLink2URL: http://www.yageo.com/documents/recent/PYu-RC_Group_51_RoHS_L_10.pdf?src-supplier=Digikey; ComponentLink2Description: http://www.yageo.com/documents/recent/PYu-RC_Group_51_RoHS_L_10.pdf?src-supplier=Digikey; ComponentLink3URL: http://www.yageo.com/documents/recent/PYu-RC_Group_51_RoHS_L_9.pdf?src-supplier=Digikey; ComponentLink3Description: http://www.yageo.com/documents/recent/PYu-RC_Group_51_RoHS_L_9.pdf?src-supplier=Digikey; ComponentLink4URL: https://datasheet.octopart.com/RC0201FR-0714K3L-Yageo-datasheet-164759695.pdf?src-supplier=Future+Electronics; ComponentLink4Description: https://datasheet.octopart.com/RC0201FR-0714K3L-Yageo-datasheet-164759695.pdf?src-supplier=Future+Electronics
footprint Res-0201
pins: 1, 2

## RC0201FR-0715KL
designator R?, comment 15k
RES 15K OHM 1% 1/20W 0201; Manufacturer: Yageo; Manufacturer Part Number: RC0201FR-0715KL; Voltage Rating (DC): 25V; Item Type: Resistor; Supplier 1: Future Electronics; RoHS: Yes; Category: Chip SMD Resistors; Stock 1: 360000; Pricing 1: 10000=0.0035, 50000=0.0033, 250000=0.0031, 750000=0.003, 2000000=0.0028 (USD); Lead Free: 5697LeadFree; ComponentLink1URL: https://datasheet.ciiva.com/6002/1563626-6002808.pdf?src-supplier=Farnell; ComponentLink1Description: https://datasheet.ciiva.com/6002/1563626-6002808.pdf?src-supplier=Farnell; ComponentLink2URL: https://datasheet.ciiva.com/22661/1563626-22661288.pdf?src-supplier=Element14; ComponentLink2Description: https://datasheet.ciiva.com/22661/1563626-22661288.pdf?src-supplier=Element14; Supplier Part Number 1: 9770686; LCSC Part Number: C295774
footprint Res-0201
pins: 1, 2

## RC0201FR-0722K1L
designator R?, comment 22.1K
RES 22.1K OHM 1% 1/20W 0201; Manufacturer: Yageo; Manufacturer Part Number: RC0201FR-0722K1L; Item Type: Resistors; Supplier: Future Electronics; LCSC Part Number: C142019; RoHS: Yes; Stock: 70000; Pricing: 10000=0.0013, 40000=0.0012, 150000=0.0012, 400000=0.0011, 1000000=0.0011 (USD); RoHS Compliant: 5897YesNo; ComponentLink1URL: http://www.mouser.com/ds/2/447/RC0201-559633.pdf?src-supplier=Mouser; ComponentLink1Description: http://www.mouser.com/ds/2/447/RC0201-559633.pdf?src-supplier=Mouser; ComponentLink2URL: https://www.yageo.com/upload/media/product/productsearch/datasheet/rchip/PYu-RC_Group_51_RoHS_L_11.pdf?src-supplier=Digikey; ComponentLink2Description: https://www.yageo.com/upload/media/product/productsearch/datasheet/rchip/PYu-RC_Group_51_RoHS_L_11.pdf?src-supplier=Digikey; ComponentLink3URL: http://www.yageo.com/documents/recent/PYu-RC_Group_51_RoHS_L_9.pdf?src-supplier=Digikey; ComponentLink3Description: http://www.yageo.com/documents/recent/PYu-RC_Group_51_RoHS_L_9.pdf?src-supplier=Digikey; ComponentLink4URL: http://www.yageo.com/documents/recent/PYu-RC_Group_51_RoHS_L_10.pdf?src-supplier=Digikey; ComponentLink4Description: http://www.yageo.com/documents/recent/PYu-RC_Group_51_RoHS_L_10.pdf?src-supplier=Digikey; ComponentLink5URL: https://datasheet.octopart.com/RC0201FR-0722K1L-Yageo-datasheet-164759695.pdf?src-supplier=Future+Electronics; ComponentLink5Description: https://datasheet.octopart.com/RC0201FR-0722K1L-Yageo-datasheet-164759695.pdf?src-supplier=Future+Electronics
footprint Res-0201
pins: 1, 2

## RC0201FR-0722RL
designator R?, comment 22R
RES 22 OHM 1% 1/20W 0201; Manufacturer: Yageo; Manufacturer Part Number: RC0201FR-0722RL; Item Type: Resistor; Supplier: Future Electronics; Supplier Part Number: 5973409; RoHS: Yes; Category: Chip SMD Resistors; Stock: 17980000; Pricing: 10000=0.0014, 50000=0.0013, 250000=0.0013, 750000=0.0012, 2000000=0.0011 (USD); ComponentLink1URL: https://datasheet.ciiva.com/7672/1563626-7672215.pdf?src-supplier=Element14; ComponentLink1Description: https://datasheet.ciiva.com/7672/1563626-7672215.pdf?src-supplier=Element14; LCSC Part Number: C155743
footprint Res-0201
pins: 1, 2

## RC0201FR-0723K7L
designator R?, comment 23.7K
RES 23.7K OHM 1% 1/20W 0201; Manufacturer: Yageo; Manufacturer Part Number: RC0201FR-0723K7L; Value: 23.7kR; Max Power Dissipation: 50mW; Temperature Coefficient: 200ppm/°C; Item Type: Resistor; Supplier 1: Arrow Electronics; RoHS: Yes; Category: Chip SMD Resistors; Stock 1: 11544; Pricing 1: 1=0.09400, 10=0.01600, 25=0.01580, 100=0.00660, 250=0.00650, 1000=0.00380, 3000=0.00280 (USD); Case/Package: 0201; Case Code (Metric): 0603; Case Code (Imperial): 0201; Min Operating Temperature: -55°C; Max Operating Temperature: 125°C; Packaging: Cut Tape; Number of Terminations: 2; Tolerance: 1%; Features: Moisture Resistant; Series: RC; Lead Free: Lead Free; RoHS Compliant: Yes; ComponentLink1URL: http://www.yageo.com/documents/recent/PYu-RC_Group_51_RoHS_L_9.pdf?src-supplier=Digi-Key; ComponentLink1Description: http://www.yageo.com/documents/recent/PYu-RC_Group_51_RoHS_L_9.pdf?src-supplier=Digi-Key; Supplier Part Number 1: RC0201FR-0723K7L; LCSC Part Number: C474614
footprint Res-0201
pins: 1, 2

## RC0201FR-0727RL
designator R?, comment 27R
RES 27 OHM 1% 1/20W 0201; Manufacturer: Yageo; Manufacturer Part Number: RC0201FR-0727RL; Item Type: Resistors; Supplier: Future Electronics; LCSC Part Number: C273268; RoHS: Yes; Stock: 20000; Pricing: 10000=0.0007, 50000=0.0006, 250000=0.0006, 1000000=0.0006, 2500000=0.0006 (USD); ComponentLink1URL: http://www.mouser.com/ds/2/447/RC0201-559633.pdf?src-supplier=Mouser; ComponentLink1Description: http://www.mouser.com/ds/2/447/RC0201-559633.pdf?src-supplier=Mouser; ComponentLink2URL: https://datasheet.octopart.com/RC0201FR-0727RL-Yageo-datasheet-164759695.pdf?src-supplier=Future+Electronics; ComponentLink2Description: https://datasheet.octopart.com/RC0201FR-0727RL-Yageo-datasheet-164759695.pdf?src-supplier=Future+Electronics; ComponentLink3URL: https://www.yageo.com/upload/media/product/productsearch/datasheet/rchip/PYu-RC_Group_51_RoHS_L_11.pdf?src-supplier=Digikey; ComponentLink3Description: https://www.yageo.com/upload/media/product/productsearch/datasheet/rchip/PYu-RC_Group_51_RoHS_L_11.pdf?src-supplier=Digikey; ComponentLink4URL: http://www.yageo.com/documents/recent/PYu-RC_Group_51_RoHS_L_9.pdf?src-supplier=Digikey; ComponentLink4Description: http://www.yageo.com/documents/recent/PYu-RC_Group_51_RoHS_L_9.pdf?src-supplier=Digikey
footprint Res-0201
pins: 1, 2

## RC0201FR-0728K7L
designator R?, comment 28.7K
RES 28.7K OHM 1% 1/20W 0201; Manufacturer: Yageo; Manufacturer Part Number: RC0201FR-0728K7L; Item Type: Resistors; Voltage Rating: 25V; Supplier: Avnet; LCSC Part Number: C138158; RoHS: Yes; Stock: 10000; Pricing: 1=0.104, 25=0.015, 100=0.008, 250=0.007, 500=0.006 (USD); ComponentLink1URL: https://www.yageo.com/upload/media/product/productsearch/datasheet/rchip/PYu-RC_Group_51_RoHS_L_11.pdf?src-supplier=Digikey; ComponentLink1Description: https://www.yageo.com/upload/media/product/productsearch/datasheet/rchip/PYu-RC_Group_51_RoHS_L_11.pdf?src-supplier=Digikey; ComponentLink2URL: http://www.yageo.com/documents/recent/PYu-RC_Group_51_RoHS_L_10.pdf?src-supplier=Digikey; ComponentLink2Description: http://www.yageo.com/documents/recent/PYu-RC_Group_51_RoHS_L_10.pdf?src-supplier=Digikey; ComponentLink3URL: http://www.yageo.com/documents/recent/PYu-RC_Group_51_RoHS_L_9.pdf?src-supplier=Digikey; ComponentLink3Description: http://www.yageo.com/documents/recent/PYu-RC_Group_51_RoHS_L_9.pdf?src-supplier=Digikey; ComponentLink4URL: https://datasheet.octopart.com/RC0201FR-0728K7L-Yageo-datasheet-164759695.pdf?src-supplier=Future+Electronics; ComponentLink4Description: https://datasheet.octopart.com/RC0201FR-0728K7L-Yageo-datasheet-164759695.pdf?src-supplier=Future+Electronics
footprint Res-0201
pins: 1, 2

## RC0201FR-0733RL
designator R?, comment 33R
RES 33 OHM 1% 1/20W 0201; Manufacturer: Yageo; Manufacturer Part Number: RC0201FR-0733RL; Item Type: Resistor; Supplier: Future Electronics; Supplier Part Number: 6199285; RoHS: Yes; Category: Chip SMD Resistors; Stock: 1420000; Pricing: 10000=0.0013, 50000=0.0012, 250000=0.0012, 750000=0.0011, 2000000=0.001 (USD); ComponentLink1URL: https://datasheet.ciiva.com/2560/pyu-r-int-thick-7-2560877.pdf?src-supplier=Digi-Key; ComponentLink1Description: https://datasheet.ciiva.com/2560/pyu-r-int-thick-7-2560877.pdf?src-supplier=Digi-Key; ComponentLink2URL: https://datasheet.ciiva.com/2560/pyu-r-int-thick-7-2560878.pdf?src-supplier=Digi-Key; ComponentLink2Description: https://datasheet.ciiva.com/2560/pyu-r-int-thick-7-2560878.pdf?src-supplier=Digi-Key; ComponentLink3URL: https://datasheet.ciiva.com/2560/pyu-r-int-thick-7-2560879.pdf?src-supplier=Digi-Key; ComponentLink3Description: https://datasheet.ciiva.com/2560/pyu-r-int-thick-7-2560879.pdf?src-supplier=Digi-Key; ComponentLink4URL: https://datasheet.ciiva.com/7672/1563626-7672223.pdf?src-supplier=Element14; ComponentLink4Description: https://datasheet.ciiva.com/7672/1563626-7672223.pdf?src-supplier=Element14; ComponentLink5URL: https://datasheet.ciiva.com/22698/1563626-22698520.pdf?src-supplier=Element14; ComponentLink5Description: https://datasheet.ciiva.com/22698/1563626-22698520.pdf?src-supplier=Element14; LCSC Part Number: C295794
footprint Res-0201
pins: 1, 2